# Altium footprint library SamacSys.PcbLib: 1008 footprints (part 18 of 63)
Each footprint in its own frame and in the unit in brackets; x right, y up, seen from the top. Pads: shape width x height; smd on the part's side, far side on the other; paste and mask are expansions set on the pad; w line width, h text height; cw(c..) or ccw(c..) is an arc to the next point about the centre after c.
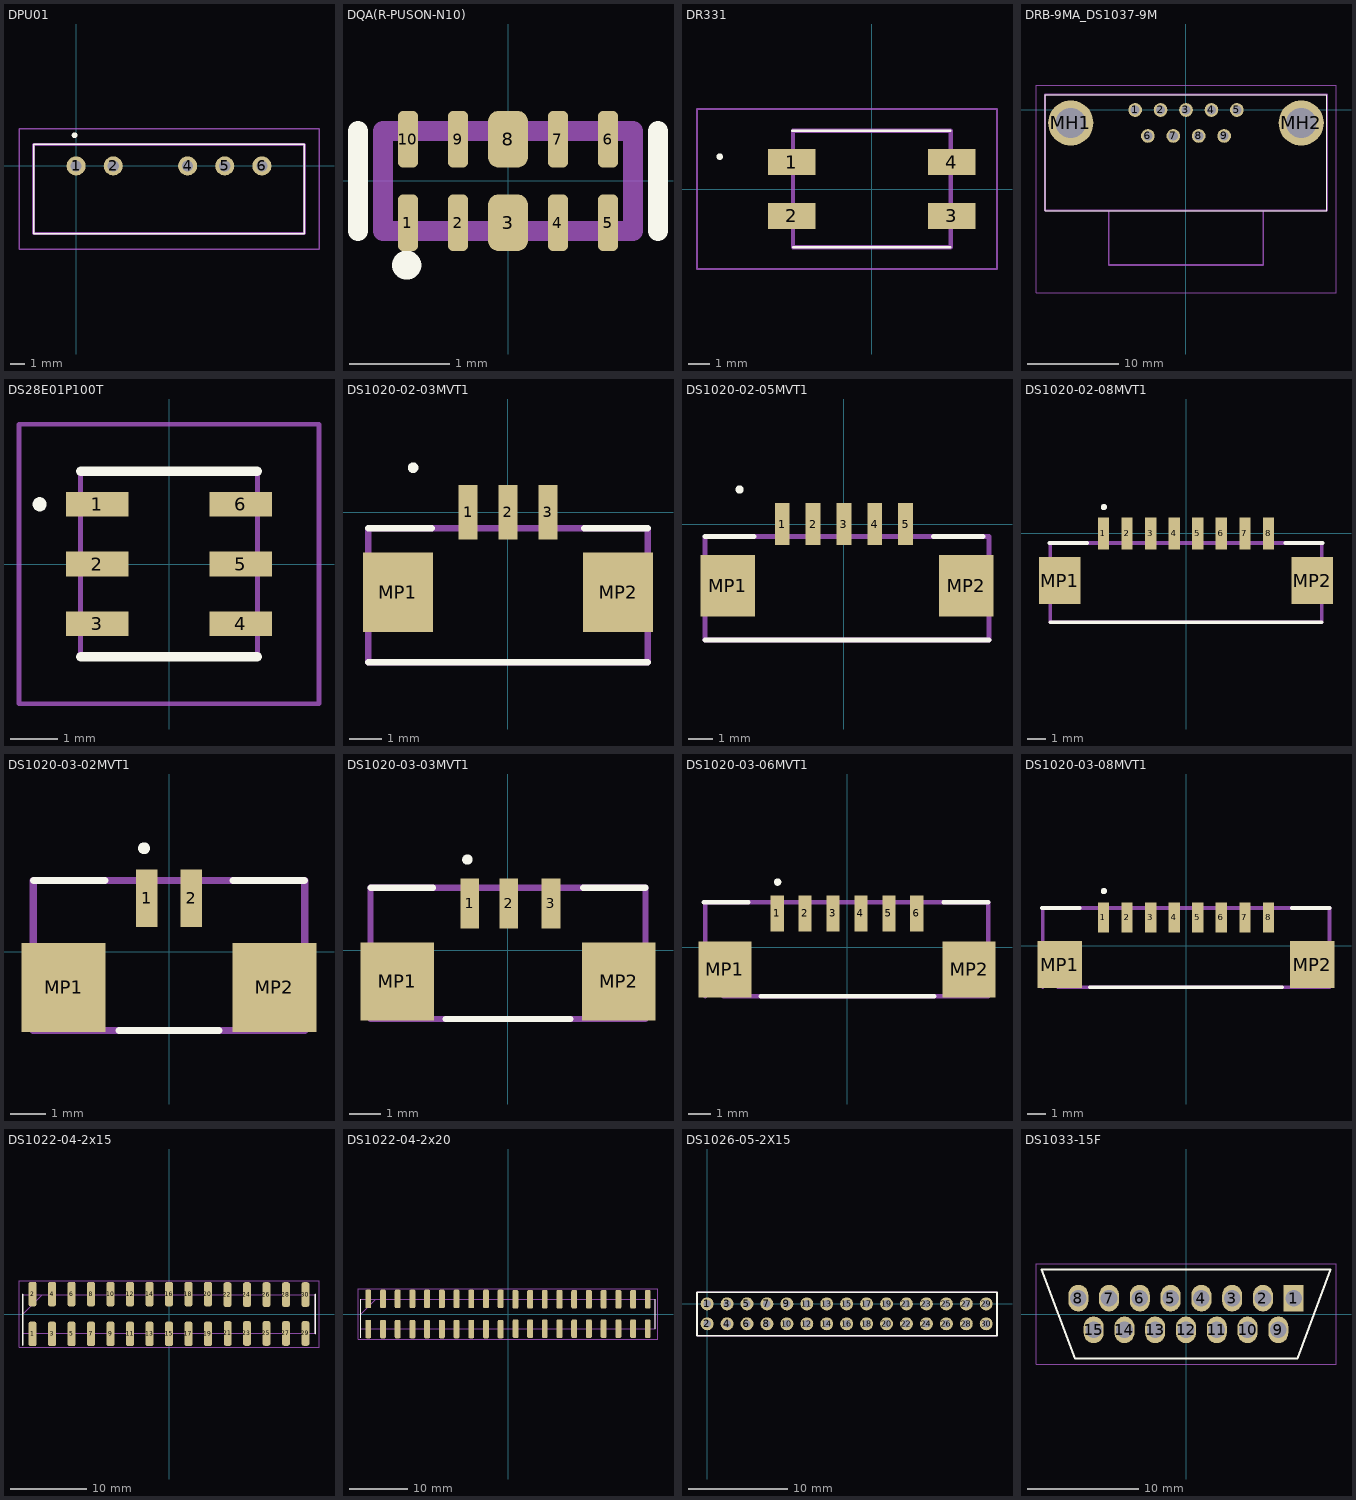
[diagram p17: the footprints below, top view; thin cyan lines are the x and y axes]

## DPU01 [mm]
pads (5):
  round 1.303 hole 0.76: 1(0,0) 2(2.54,0) 4(7.62,0) 5(10.16,0) 6(12.7,0)
Top Overlay:
  lines w0.1: -2.9,-4.625 15.6,-4.625 15.6,1.475 -2.9,1.475 -2.9,-4.625
  lines w0.2: -0.2,2.1 ccw(c-0.1,2.1) 0,2.1 ccw(c-0.1,2.1) -0.2,2.1
Assembly:
  lines w0.2: -2.9,-4.625 15.6,-4.625 15.6,1.475 -2.9,1.475 -2.9,-4.625
Countryard:
  lines w0.1: -3.9,-5.7 16.6,-5.7 16.6,2.55 -3.9,2.55 -3.9,-5.7
3D body "DPU01M-05.stp": height 10.55, standoff -5, extent -2.9,-4.625 15.6,1.475

## DQA(R-PUSON-N10) [mm]
pads (10):
  rrect50% 0.2x0.565 smd mask+0.07: 1(-1,-0.417) 2(-0.5,-0.417) 4(0.5,-0.417) 5(1,-0.417) 6(1,0.417) 7(0.5,0.417) 9(-0.5,0.417) 10(-1,0.417)
  rrect50% 0.4x0.565 smd paste-0.02 mask+0.07: 3(0,-0.417) 8(0,0.417)
Top Overlay:
  circle w0.254: c-1.013,-0.842 r0.019
  lines w0.2: -1.5,-0.5 -1.5,0.5 ; 1.5,-0.5 1.5,0.5
Assembly:
  lines w0.2: -1.25,-0.5 1.25,-0.5 1.25,0.5 -1.25,0.5 -1.25,-0.5
3D body "TPD4EUSB30DQAR.stp": height 0.55, standoff 0, extent -1.25,-0.5 1.25,0.5

## DR331 [mm]
height 5
pads (4):
  rect 2.2x1.2 smd: 1(-3.7,1.25) 2(-3.7,-1.25) 3(3.7,-1.25) 4(3.7,1.25)
Top Overlay:
  lines w0.1: -3.7,2.7 3.65,2.7 -3.7,2.7 ; -3.65,-2.7 3.65,-2.7 -3.65,-2.7
  lines w0.2: -7.1,1.5 ccw(c-7.05,1.5) -7,1.5 ; -7.1,1.5 cw(c-7.05,1.5) -7,1.5 ; -7.1,1.5 ccw(c-7.05,1.5) -7,1.5
Assembly:
  lines w0.2: -3.65,-2.7 3.65,-2.7 3.65,2.7 -3.65,2.7 -3.65,-2.7
Countryard:
  lines w0.1: -8.1,-3.7 5.8,-3.7 5.8,3.7 -8.1,3.7 -8.1,-3.7
3D body "DR331-105BE.stp": height 4.71, standoff 0.01, extent -4.5,-2.7 4.5,2.7

## DRB-9MA_DS1037-9M [mm]
pads (11):
  round 1.5 hole 1: 1(-5.56,0) 2(-2.78,0) 3(0,0) 4(2.78,0) 5(5.56,0) 6(-4.17,-2.84) 7(-1.39,-2.84) 8(1.39,-2.84) 9(4.17,-2.84)
  round 4.95 hole 3.3: MH1(-12.6,-1.42) MH2(12.6,-1.42)
Top Overlay:
  lines w0.1: -15.405,-11 -15.405,1.68 15.405,1.68 15.405,-11 -15.405,-11
Assembly:
  lines w0.2: -8.45,-10.97 -8.45,-16.97 8.45,-16.97 8.45,-10.97 ; -15.405,-11 -15.405,1.68 15.405,1.68 15.405,-11 -15.405,-11
Countryard:
  lines w0.1: -16.405,-19.97 -16.405,2.68 16.405,2.68 16.405,-19.97 -16.405,-19.97
3D body "2301843-1.stp": height 13.59, standoff -3.79, extent -15.415,-18.95 15.395,1.7

## DS28E01P100T [mm]
pads (6):
  rect 1.33x0.53 smd: 1(-1.525,1.27) 2(-1.525,0) 3(-1.525,-1.27) 4(1.525,-1.27) 5(1.525,0) 6(1.525,1.27)
Top Overlay:
  lines w0.2: -1.88,-1.97 1.88,-1.97 ; -1.88,1.97 1.88,1.97 ; -2.8,1.27 ccw(c-2.75,1.27) -2.7,1.27 ; -2.8,1.27 cw(c-2.75,1.27) -2.7,1.27 ; -2.8,1.27 ccw(c-2.75,1.27) -2.7,1.27
Assembly:
  lines w0.1: -1.88,-1.97 -1.88,1.97 1.88,1.97 1.88,-1.97 -1.88,-1.97
Countryard:
  lines w0.1: -3.19,-2.97 -3.19,2.97 3.19,2.97 3.19,-2.97 -3.19,-2.97
3D body "DS28E01P-100+T.stp": height 1.6, standoff 0, extent -1.88,-1.97 1.88,1.97

## DS1020-02-03MVT1 [mm]
pads (5):
  rect 0.6x1.7 smd: 1(-1.25,0) 2(0,0) 3(1.25,0)
  rect 2.2x2.5 smd: MP1(-3.45,-2.5) MP2(3.45,-2.5)
Top Overlay:
  circle w0.2: c-2.974,1.399 r0.066
  lines w0.2: -4.375,-4.7 4.375,-4.7 ; -4.375,-0.5 -2.385,-0.5 ; 2.385,-0.5 4.375,-0.5
Assembly:
  lines w0.2: -4.375,-4.7 4.375,-4.7 4.375,-0.5 -4.375,-0.5 -4.375,-4.7
3D body "532610371.stp": height 3.4, standoff 0, extent -4.45,-4.6 4.45,0.6

## DS1020-02-05MVT1 [mm]
pads (7):
  rect 0.6x1.7 smd: 1(-2.5,0) 2(-1.25,0) 3(0,0) 4(1.25,0) 5(2.5,0)
  rect 2.2x2.5 smd: MP1(-4.7,-2.5) MP2(4.95,-2.5)
Top Overlay:
  circle w0.2: c-4.224,1.399 r0.066
  lines w0.2: -5.625,-4.7 5.875,-4.7 ; -5.625,-0.5 -3.635,-0.5 ; 3.635,-0.5 5.625,-0.5
Assembly:
  lines w0.2: -5.625,-4.7 -5.625,-0.5 5.875,-0.5 5.875,-4.7 -5.625,-4.7
3D body "53261-0571.stp": height 3.4, standoff 0, extent -5.575,-4.45 5.825,0.75

## DS1020-02-08MVT1 [mm]
pads (10):
  rect 0.6x1.7 smd: 1(-4.375,0) 2(-3.125,0) 3(-1.875,0) 4(-0.625,0) 5(0.625,0) 6(1.875,0) 7(3.125,0) 8(4.375,0)
  rect 2.2x2.5 smd: MP1(-6.7,-2.5) MP2(6.7,-2.5)
Top Overlay:
  circle w0.2: c-4.349,1.399 r0.066
  lines w0.2: -7.24,-0.5 -5.25,-0.5 ; -7.19,-4.7 7.19,-4.7 ; 5.26,-0.5 7.25,-0.5
Assembly:
  lines w0.2: -7.19,-4.7 7.19,-4.7 7.19,-0.5 -7.19,-0.5 -7.19,-4.7
3D body "53261-0871.stp": height 3.4, standoff 0, extent -7.575,-4.475 7.575,0.725

## DS1020-03-02MVT1 [mm] "Molex 53398-4002"
height 5.5
pads (4):
  rect 0.6x1.6 smd: 1(-0.625,1.5) 2(0.625,1.5)
  rect 2.35x2.5 smd: MP1(-2.95,-1) MP2(2.95,-1)
Top Overlay:
  circle w0.2: c-0.7,2.9 r0.066
  lines w0.2: -3.79,2 -1.8,2 ; -1.4,-2.2 1.4,-2.2 ; 1.8,2 3.79,2
Assembly:
  lines w0.2: -3.8,-2.2 3.8,-2.2 3.8,2 -3.8,2 -3.8,-2.2
3D body "0533980271.stp": height 4.7, standoff 0, extent -3.825,-2.2 3.825,2

## DS1020-03-03MVT1 [mm] "Molex 53398-4002"
height 5.5
pads (5):
  rect 0.6x1.6 smd: 1(-1.225,1.5) 2(0.025,1.5) 3(1.375,1.5)
  rect 2.35x2.5 smd: MP1(-3.55,-1) MP2(3.55,-1)
Top Overlay:
  circle w0.2: c-1.3,2.9 r0.066
  lines w0.2: -4.39,2 -2.4,2 ; -2,-2.2 2,-2.2 ; 2.41,2 4.4,2
Assembly:
  lines w0.2: -4.4,-2.2 -4.4,2 4.4,2 4.4,-2.2 -4.4,-2.2
3D body "0533980371.stp": height 4.7, standoff 0, extent -4.45,-2.2 4.45,2

## DS1020-03-06MVT1 [mm] "Molex 53398-4008 / Molex 53398-0871"
height 5.5
pads (8):
  rect 0.6x1.6 smd: 1(-3.125,1.5) 2(-1.875,1.5) 3(-0.625,1.5) 4(0.625,1.5) 5(1.875,1.5) 6(3.125,1.5)
  rect 2.35x2.5 smd: MP1(-5.45,-1) MP2(5.45,-1)
Top Overlay:
  circle w0.2: c-3.099,2.899 r0.066
  lines w0.2: -6.39,2 -4.4,2 ; -3.85,-2.2 3.9,-2.2 ; 4.31,2 6.3,2
Assembly:
  lines w0.2: -6.34,-2.2 -6.34,2 6.3,2 6.3,-2.2 -5.53,-2.2
3D body "0533980671.stp": height 4.7, standoff 0, extent -6.325,-2.2 6.325,2

## DS1020-03-08MVT1 [mm] "Molex 53398-4008 / Molex 53398-0871"
height 5.5
pads (10):
  rect 0.6x1.6 smd: 1(-4.375,1.5) 2(-3.125,1.5) 3(-1.875,1.5) 4(-0.625,1.5) 5(0.625,1.5) 6(1.875,1.5) 7(3.125,1.5) 8(4.375,1.5)
  rect 2.35x2.5 smd: MP1(-6.7,-1) MP2(6.7,-1)
Top Overlay:
  circle w0.2: c-4.349,2.899 r0.066
  lines w0.2: -7.64,2 -5.65,2 ; -5.1,-2.2 5.1,-2.2 ; 5.61,2 7.6,2
Assembly:
  lines w0.2: -7.59,-2.2 -7.59,2 7.6,2 7.6,-2.2 -6.78,-2.2
3D body "0533984008.stp": height 4.7, standoff 0, extent -7.575,-2.2 7.575,2

## DS1022-04-2x15 [mm]
pads (30):
  rrect50% 1.02x3.2 smd: 1(-17.78,-2.6) 2(-17.78,2.6) 3(-15.24,-2.6) 4(-15.24,2.6) 5(-12.7,-2.6) 6(-12.7,2.6) 7(-10.16,-2.6) 8(-10.16,2.6) 9(-7.62,-2.6) 10(-7.62,2.6) 11(-5.08,-2.6) 12(-5.08,2.6) 13(-2.54,-2.6) 14(-2.54,2.6) 15(0,-2.6) 16(0,2.6) 17(2.54,-2.6) 18(2.54,2.6) 19(5.08,-2.6) 20(5.08,2.6) 21(7.65,-2.54) 22(7.62,2.54) 23(10.16,-2.54) 24(10.16,2.54) 25(12.7,-2.54) 26(12.7,2.54) 27(15.24,-2.54) 28(15.24,2.54) 29(17.78,-2.54) 30(17.78,2.54)
Top Overlay:
  lines w0.2: -19.05,-4.075 -19.05,2.54 ; 19.05,-2.54 19.05,2.54
Assembly:
  lines w0.1: -19.05,0 -16.51,2.54 ; -19.05,-2.54 -19.05,2.54 19.05,2.54 19.05,-2.54 -19.05,-2.54
Countryard:
  lines w0.05: -19.55,-4.325 -19.55,4.325 19.55,4.325 19.55,-4.325 -19.55,-4.325
3D body "61002021121.stp": height 9.95, standoff 0, extent -19.3,-3.75 6.6,3.75
3D body "61002021121.stp": height 9.95, standoff 0, extent -6.6,-3.75 19.3,3.75

## DS1022-04-2x20 [mm]
pads (40):
  rrect50% 1.02x3.2 smd: 1(-24.13,-2.6) 2(-24.13,2.6) 3(-21.59,-2.6) 4(-21.59,2.6) 5(-19.05,-2.6) 6(-19.05,2.6) 7(-16.51,-2.6) 8(-16.51,2.6) 9(-13.97,-2.6) 10(-13.97,2.6) 11(-11.43,-2.6) 12(-11.43,2.6) 13(-8.89,-2.6) 14(-8.89,2.6) 15(-6.35,-2.6) 16(-6.35,2.6) 17(-3.81,-2.6) 18(-3.81,2.6) 19(-1.27,-2.6) 20(-1.27,2.6) 21(1.3,-2.54) 22(1.27,2.54) 23(3.81,-2.54) 24(3.81,2.54) 25(6.35,-2.54) 26(6.35,2.54) 27(8.89,-2.54) 28(8.89,2.54) 29(11.43,-2.54) 30(11.43,2.54) 31(13.97,-2.54) 32(13.97,2.54) 33(16.51,-2.54) 34(16.51,2.54) 35(19.05,-2.54) 36(19.05,2.54) 37(21.59,-2.54) 38(21.59,2.54) 39(24.13,-2.54) 40(24.13,2.54)
Top Overlay:
  lines w0.2: -25.4,-4.075 -25.4,2.54 ; 25.4,-2.54 25.4,2.54
Assembly:
  lines w0.1: -25.4,0 -22.86,2.54 ; -25.4,-2.54 25.4,-2.54 25.4,2.54 -25.4,2.54 -25.4,-2.54
Countryard:
  lines w0.05: -25.9,-4.325 25.9,-4.325 25.9,4.325 -25.9,4.325 -25.9,-4.325
3D body "61002021121.stp": height 9.95, standoff 0, extent -25.65,-3.75 0.25,3.75
3D body "61002021121.stp": height 9.95, standoff 0, extent -0.25,-3.75 25.65,3.75

## DS1026-05-2X15 [mm]
pads (30):
  round 1.3 hole 0.75 mask+0.076: 1(0,0) 2(0,-2) 3(2,0) 4(2,-2) 5(4,0) 6(4,-2) 7(6,0) 8(6,-2) 9(8,0) 10(8,-2) 11(10,0) 12(10,-2) 13(12,0) 14(12,-2) 15(14,0) 16(14,-2) 17(16,0) 18(16,-2) 19(18,0) 20(18,-2) 21(20,0) 22(20,-2) 23(22,0) 24(22,-2) 25(24,0) 26(24,-2) 27(26,0) 28(26,-2) 29(28,0) 30(28,-2)
Top Overlay:
  lines w0.152: -1.016,-3.175 -1.016,1.143 29.083,1.143 29.083,-3.175 -1.016,-3.175
Assembly:
  lines w0.127: -1.016,-3.175 -1.016,1.143 29.083,1.143 29.083,-3.175 -1.016,-3.175
3D body "PBD2-30.step": height 4.3, standoff -2.7, extent -1.058,-3.03 28.942,1.07

## DS1033-15F [mm]
height 7.1
pads (15):
  rect 1.8x2.4 hole 1.5: 1(9.695,1.42)
  oval 1.8x2.4 hole 1.5: 2(6.925,1.42) 3(4.155,1.42) 4(1.385,1.42) 5(-1.385,1.42) 6(-4.155,1.42) 7(-6.925,1.42) 8(-9.695,1.42) 9(8.31,-1.42)
  oval 1.8x2.4 hole 1.5 unplated: 10(5.54,-1.42) 11(2.77,-1.42) 12(0,-1.42) 13(-2.77,-1.42) 14(-5.54,-1.42) 15(-8.31,-1.42)
Top Overlay:
  lines w0.2: -13,4 13,4 10.031,-4 -10,-4 -13,4
Assembly:
  lines w0.1: -13.5,-4.5 13.5,-4.5 13.5,4.5 -13.5,4.5 -13.5,-4.5
Countryard:
  lines w0.1: -13.5,-4.5 -13.5,4.5 13.5,4.5 13.5,-4.5 -13.5,-4.5
3D body "DB15_F.STEP": height 15, standoff -0.72, extent -20,-6.5 20,6.5